# Altium footprint library Footprint_Vlad.PcbLib: 392 footprints (part 5 of 25)
Each footprint in its own frame and in the unit in brackets; x right, y up, seen from the top. Pads: shape width x height; smd on the part's side, far side on the other; paste and mask are expansions set on the pad; w line width, h text height; cw(c..) or ccw(c..) is an arc to the next point about the centre after c.
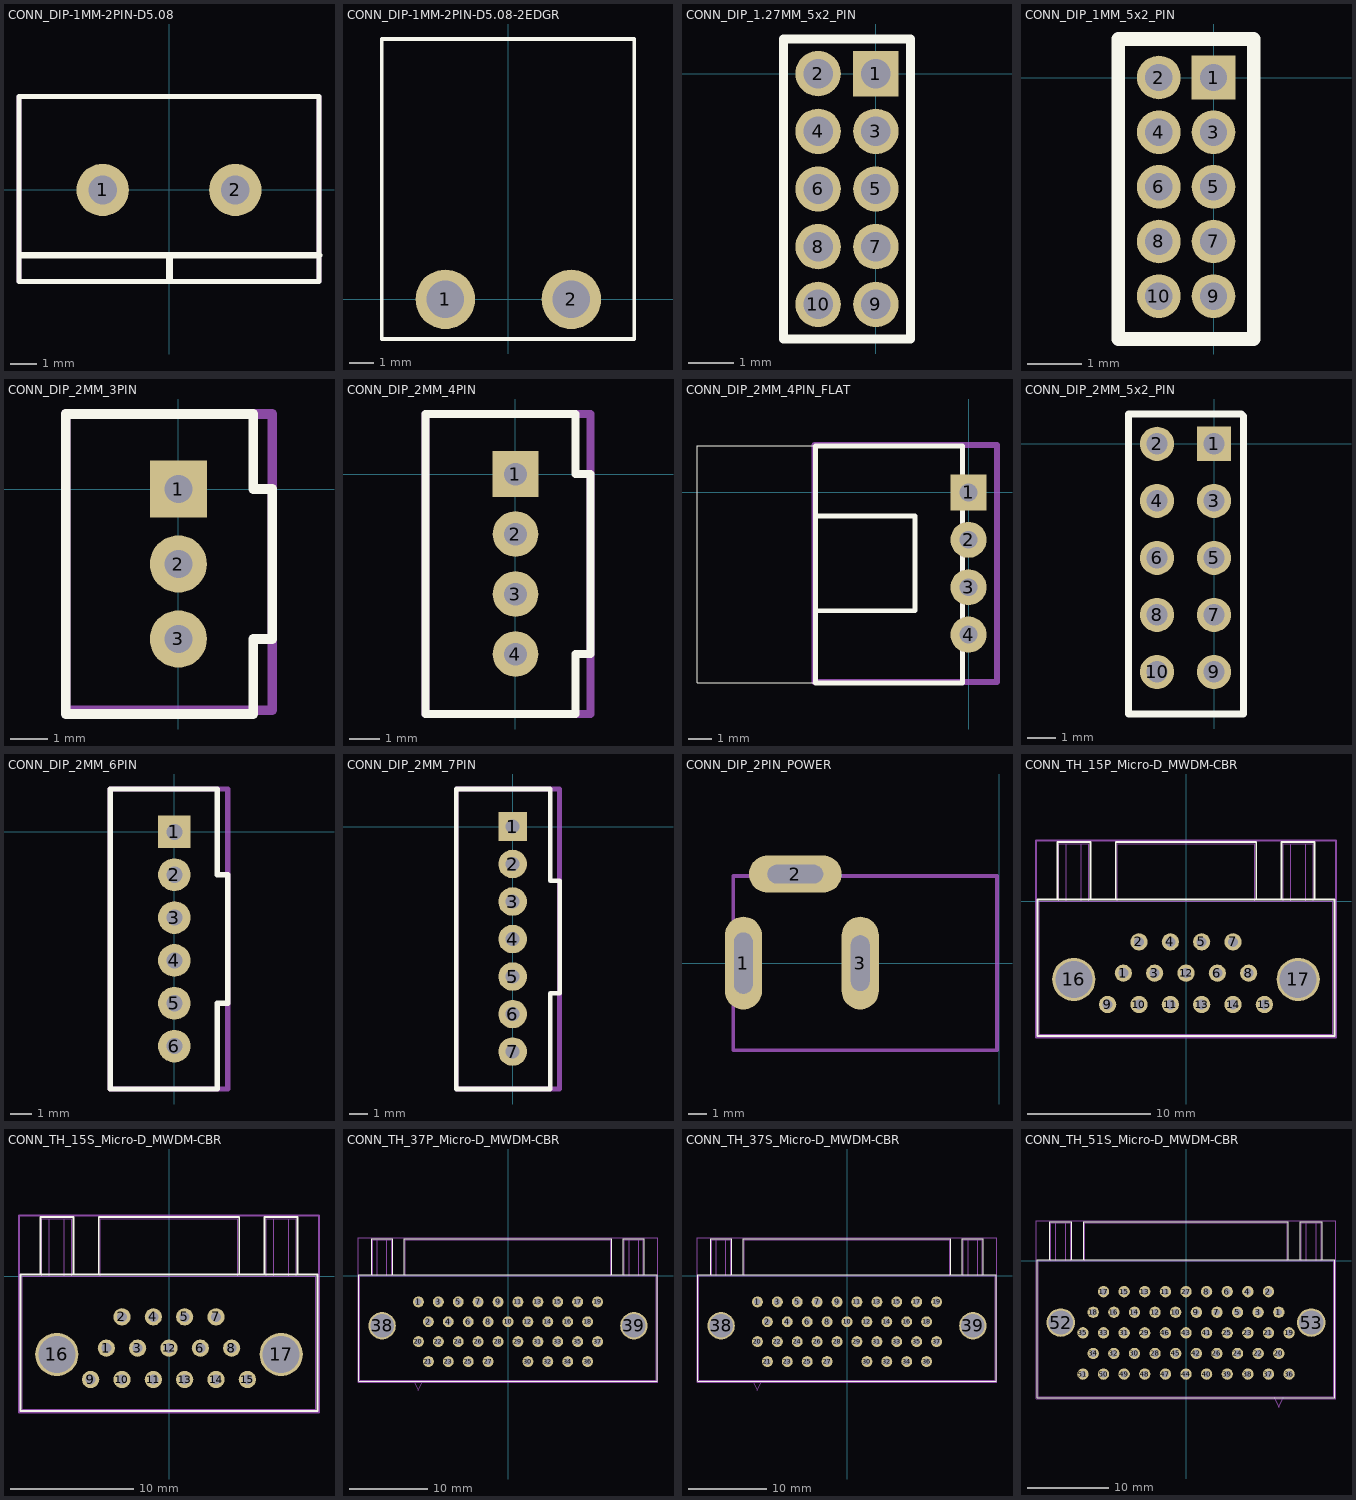
[diagram p4: the footprints below, top view; thin cyan lines are the x and y axes]

## CONN_DIP-1MM-2PIN-D5.08 [mm]
pads (2):
  round 2 hole 1.1: 1(-2.54,0) 2(2.54,0)
Top Overlay:
  lines w0.2: -5.74,-3.5 5.74,-3.5 5.74,3.575 -5.74,3.575 -5.74,-3.5
  lines w0.254: -5.7,-2.5 5.74,-2.5 ; 0.02,-3.4 0.02,-2.5
  text ".Designator" at -3.415,2.086 h1.52
Mechanical 15:
  lines w0.2: -5.74,-3.5 -5.74,3.575 5.74,3.575 5.74,-3.5 -5.74,-3.5
  text ".Designator" at -3.415,2.086 h1.52
3D body "38261.stp": height 15.1, standoff -3.4, extent -5.665,-4.8 5.065,4.7

## CONN_DIP-1MM-2PIN-D5.08-2EDGR [mm]
pads (2):
  round 2.4 hole 1.5: 1(-2.54,0) 2(2.54,0)
Top Overlay:
  lines w0.15: -5.1,-1.6 5.075,-1.6 5.075,10.5 -5.1,10.5 -5.1,-1.6
  text ".Designator" at -3.415,2.086 h1.52
Mechanical 15:
  text ".Designator" at -3.415,2.086 h1.52
3D body "User Library-2EDGR-5_08-02P.step": height 8.3, standoff -3.9, extent -5.09,-1.6 5.07,10.5

## CONN_DIP_1.27MM_5x2_PIN [mm]
pads (10):
  rect 1x1 hole 0.65: 1(0,0)
  round 1 hole 0.65: 2(-1.27,0) 3(0,-1.27) 4(-1.27,-1.27) 5(0,-2.54) 6(-1.27,-2.54) 7(0,-3.81) 8(-1.27,-3.81) 9(0,-5.08) 10(-1.27,-5.08)
Top Overlay:
  lines w0.2: -2.032,-5.842 -2.032,0.762 0.762,0.762 0.762,-5.842 -2.032,-5.842
Mechanical 15:
  text ".Designator" at -2.7,2.4 h1.52

## CONN_DIP_1MM_5x2_PIN [mm]
pads (10):
  rect 0.8x0.8 hole 0.5: 1(0,0)
  round 0.8 hole 0.5: 2(-1,0) 3(0,-1) 4(-1,-1) 5(0,-2) 6(-1,-2) 7(0,-3) 8(-1,-3) 9(0,-4) 10(-1,-4)
Top Overlay:
  lines w0.254: -1.744,-4.784 0.737,-4.784 0.737,0.705 -1.744,0.705 -1.744,-4.784
Mechanical 15:
  text ".Designator" at -2.7,2.4 h1.52

## CONN_DIP_2MM_3PIN [mil]
pads (3):
  rect 60x60 hole 29.53: 1(0,0)
  round 60 hole 29.53: 2(0,-78.74) 3(0,-157.48)
Top Overlay:
  lines w10: -118.11,-236.22 78.74,-236.22 78.74,-157.48 98.43,-157.48 98.43,0 78.74,0 78.74,78.74 -118.11,78.74 -118.11,-236.22
Mechanical 15:
  circle w10: c0,0 r11.81
  lines w10: -118.11,-232.28 98.43,-232.28 98.43,78.74 -118.11,78.74 -118.11,-232.28
  text ".Designator" at -118.11,94.49 h60

## CONN_DIP_2MM_4PIN [mil]
pads (4):
  rect 60x60 hole 29.53: 1(0,0)
  round 60 hole 29.53: 2(0,-78.74) 3(0,-157.48) 4(0,-236.22)
Top Overlay:
  lines w10: -118.11,-314.96 78.74,-314.96 78.74,-236.22 98.43,-236.22 98.43,0 78.74,0 78.74,78.74 -118.11,78.74 -118.11,-314.96
Mechanical 15:
  circle w10: c0,0 r8.8
  lines w10: -118.11,-314.96 -118.11,78.74 98.43,78.74 98.43,-314.96 -118.11,-314.96
  text ".Designator" at -98.43,98.43 h60

## CONN_DIP_2MM_4PIN_FLAT [mil]
pads (4):
  rect 60x60 hole 29.53: 1(0,0)
  round 60 hole 29.53: 2(0,-78.74) 3(0,-157.48) 4(0,-236.22)
Top Overlay:
  lines w1.97: -254.33,-316.54 -451.18,-316.54 -451.18,77.17 -254.33,77.17
  lines w7.87: -254.33,-196.46 -88.98,-196.46 -88.98,-38.98 -254.33,-38.98 ; -254.33,-316.54 -254.33,77.17 -10.24,77.17 -10.24,-316.54 -254.33,-316.54
Mechanical 15:
  circle w10: c0,0 r14.2
  lines w10: -255.91,-314.96 -255.91,78.74 47.24,78.74 47.24,-314.96 -255.91,-314.96
  text ".Designator" at -244.09,98.43 h60

## CONN_DIP_2MM_5x2_PIN [mm]
pads (10):
  rect 1.2x1.2 hole 0.75: 1(0,0)
  round 1.2 hole 0.75: 2(-2,0) 3(0,-2) 4(-2,-2) 5(0,-4) 6(-2,-4) 7(0,-6) 8(-2,-6) 9(0,-8) 10(-2,-8)
Top Overlay:
  lines w0.254: -3,-9.475 1.034,-9.475 1.034,-8 1.034,0.969 0.957,1.046 -3,1.046 -3,-9.475
Mechanical 15:
  text ".Designator" at -2.7,2.4 h1.52

## CONN_DIP_2MM_6PIN [mil]
pads (6):
  rect 60x60 hole 29.53: 1(0,0)
  round 60 hole 29.53: 2(0,-78.74) 3(0,-157.48) 4(0,-236.22) 5(0,-314.96) 6(0,-393.7)
Top Overlay:
  lines w10: -118.11,-472.44 78.74,-472.44 78.74,-314.96 98.43,-314.96 98.43,-78.74 78.74,-78.74 78.74,78.74 -118.11,78.74 -118.11,-472.44
Mechanical 15:
  circle w10: c0,0 r20.07
  lines w10: -118.11,-472.44 -118.11,78.74 98.43,78.74 98.43,-472.44 -118.11,-472.44
  text ".Designator" at -106.3,94.49 h60

## CONN_DIP_2MM_7PIN [mil]
pads (7):
  rect 60x60 hole 29.53: 1(0,0)
  round 60 hole 29.53: 2(0,-78.74) 3(0,-157.48) 4(0,-236.22) 5(0,-314.96) 6(0,-393.7) 7(0,-472.44)
Top Overlay:
  lines w10: 78.74,-350.22 78.74,-551 -118.11,-551 -118.11,78.74 78.74,78.74 78.74,-114 ; 79,-350.22 98.69,-350.22 98.69,-114 79,-114
Mechanical 15:
  circle w10: c0,0 r20.07
  lines w10: -118.11,-551 98.43,-551 98.43,78.74 -118.11,78.74 -118.11,-551
  text ".Designator" at -106.3,94.49 h60

## CONN_DIP_2PIN_POWER [mm]
pads (3):
  oval 2x5 hole 1 slot 3.3 at 90 deg: 1(-13.8,0)
  oval 5x2 hole 1 slot 3 at 0 deg: 2(-11,4.8)
  oval 2x5 hole 1 slot 3 at 90 deg: 3(-7.5,0)
Mechanical 13:
  lines w0.2: -14.351,-4.699 -0.127,-4.699 -0.127,4.699 -14.351,4.699 -14.351,-4.699
  text ".Designator" at -11.811,-4.064 h1.5
3D body "DJK-02A.step": height 11, standoff -3.78, extent -14.254,-4.65 -0.254,4.65

## CONN_TH_15P_Micro-D_MWDM-CBR [mil] "15 pin Glenair Micro-D MWDM-CBR Right Angle Thru-Hole"
height 309.84
pads (17):
  round 55 hole 32 mask+0: 1(-200,-230) 2(-150,-130) 3(-100,-230) 4(-50,-130) 5(50,-130) 6(100,-230) 7(150,-130) 8(200,-230) 9(-250,-330) 10(-150,-330) 11(-50,-330) 12(0,-230) 13(50,-330) 14(150,-330) 15(250,-330)
  round 137.8 hole 118.11 unplated: 16(-357.87,-250.08) 17(357.87,-250.08)
Top Overlay:
  lines w6: -473.5,-430 -473.5,5 473.5,5 473.5,-430 -472.44,-430 ; -410.5,7.87 -410.5,188 -304.5,188 -304.5,5 ; -224,7.87 -224,188 224,188 224,7.87 ; 304.5,5 304.5,188 410.5,188 410.5,5
Mechanical 13:
  lines w1: -405.5,0 -405.5,183 -309.5,183 -309.5,0 ; -381.5,0 -381.5,183 ; -333.5,0 -333.5,183 ; 309.5,0 309.5,183 405.5,183 405.5,0 ; 333.5,0 333.5,183 ; 381.5,0 381.5,183 ; -468.5,-425 468.5,-425 468.5,0 -468.5,0 -468.5,-425 ; -219,0 219,0 219,183 -219,183 -219,0
Mechanical 15:
  lines w6: -478.5,-435 -478.5,193 478.5,193 478.5,-435 -478.5,-435
3D body "mwdmxl-15pcbr.stp": height 312.4, standoff -106.5, extent -467.52,-420.08 467.52,186.22

## CONN_TH_15S_Micro-D_MWDM-CBR [mil] "15 pin Glenair Micro-D MWDM-CBR Right Angle Thru-Hole"
height 309.84
pads (17):
  round 55 hole 32 mask+0: 1(-200,-230) 2(-150,-130) 3(-100,-230) 4(-50,-130) 5(50,-130) 6(100,-230) 7(150,-130) 8(200,-230) 9(-250,-330) 10(-150,-330) 11(-50,-330) 12(0,-230) 13(50,-330) 14(150,-330) 15(250,-330)
  round 137.8 hole 118.11 unplated: 16(-357.87,-250.08) 17(357.87,-250.08)
Top Overlay:
  lines w6: -473.5,-430 -473.5,5 473.5,5 473.5,-430 -472.44,-430 ; -410.5,7.87 -410.5,188 -304.5,188 -304.5,5 ; -224,7.87 -224,188 224,188 224,7.87 ; 304.5,5 304.5,188 410.5,188 410.5,5
Mechanical 13:
  lines w1: -405.5,0 -405.5,183 -309.5,183 -309.5,0 ; -381.5,0 -381.5,183 ; -333.5,0 -333.5,183 ; 309.5,0 309.5,183 405.5,183 405.5,0 ; 333.5,0 333.5,183 ; 381.5,0 381.5,183 ; -468.5,-425 468.5,-425 468.5,0 -468.5,0 -468.5,-425 ; -219,0 219,0 219,183 -219,183 -219,0
Mechanical 15:
  lines w6: -478.5,-435 -478.5,193 478.5,193 478.5,-435 -478.5,-435
3D body "mwdmxl-15scbr.stp": height 312.4, standoff -101.77, extent -467.52,-420.08 467.52,198.04

## CONN_TH_37P_Micro-D_MWDM-CBR [mil] "37 pin Glenair Micro-D MWDM-CBR Right Angle Thru-Hole"
height 309.84
pads (39):
  round 55 hole 32 mask+0: 1(-450,-130) 2(-400,-230) 3(-350,-130) 4(-300,-230) 5(-250,-130) 6(-200,-230) 7(-150,-130) 8(-100,-230) 9(-50,-130) 10(0,-230) 11(50,-130) 12(100,-230) 13(150,-130) 14(200,-230) 15(250,-130) 16(300,-230) 17(350,-130) 18(400,-230) 19(450,-130) 20(-450,-330) 21(-400,-430) 22(-350,-330) 23(-300,-430) 24(-250,-330) 25(-200,-430) 26(-150,-330) 27(-100,-430) 28(-50,-330) 29(50,-330) 30(100,-430) 31(150,-330) 32(200,-430) 33(250,-330) 34(300,-430) 35(350,-330) 36(400,-430) 37(450,-330)
  round 137.8 hole 118.11 unplated: 38(-632.5,-250) 39(632.5,-250)
Top Overlay:
  lines w6: -685.5,7.87 -685.5,188 -579.5,188 -579.5,5 ; -521.5,7.87 -521.5,188 521.5,188 521.5,7.87 ; 579.5,5 579.5,188 685.5,188 685.5,5 ; -748.5,-530 -748.5,5 748.5,5 748.5,-530 -748.5,-530
Mechanical 13:
  lines w1: -680.5,0 -680.5,183 -584.5,183 -584.5,0 ; -656.5,0 -656.5,183 ; -608.5,0 -608.5,183 ; -475,-525 -450,-575 -425,-525 ; 584.5,0 584.5,183 680.5,183 680.5,0 ; 608.5,0 608.5,183 ; 656.5,0 656.5,183 ; -743.5,-525 -743.5,0 743.5,0 743.5,-525 -743.5,-525 ; -516.5,0 -516.5,183 516.5,183 516.5,0 -516.5,0
Mechanical 15:
  lines w6: -753.5,-535 753.5,-535 753.5,193 -753.5,193 -753.5,-535
3D body "mwdmxl-37pcbr.stp": height 312.4, standoff -106.5, extent -742.52,-520 742.52,186.22

## CONN_TH_37S_Micro-D_MWDM-CBR [mil] "37 pin Glenair Micro-D MWDM-CBR Right Angle Thru-Hole"
height 309.84
pads (39):
  round 55 hole 32 mask+0: 1(-450,-130) 2(-400,-230) 3(-350,-130) 4(-300,-230) 5(-250,-130) 6(-200,-230) 7(-150,-130) 8(-100,-230) 9(-50,-130) 10(0,-230) 11(50,-130) 12(100,-230) 13(150,-130) 14(200,-230) 15(250,-130) 16(300,-230) 17(350,-130) 18(400,-230) 19(450,-130) 20(-450,-330) 21(-400,-430) 22(-350,-330) 23(-300,-430) 24(-250,-330) 25(-200,-430) 26(-150,-330) 27(-100,-430) 28(-50,-330) 29(50,-330) 30(100,-430) 31(150,-330) 32(200,-430) 33(250,-330) 34(300,-430) 35(350,-330) 36(400,-430) 37(450,-330)
  round 137.8 hole 118.11 unplated: 38(-632.5,-250) 39(632.5,-250)
Top Overlay:
  lines w6: -685.5,7.87 -685.5,188 -579.5,188 -579.5,5 ; -521.5,7.87 -521.5,188 521.5,188 521.5,7.87 ; 579.5,5 579.5,188 685.5,188 685.5,5 ; -748.5,-530 748.5,-530 748.5,5 -748.5,5 -748.5,-530
Mechanical 13:
  lines w1: -680.5,0 -680.5,183 -584.5,183 -584.5,0 ; -656.5,0 -656.5,183 ; -608.5,0 -608.5,183 ; -475,-525 -450,-575 -425,-525 ; 584.5,0 584.5,183 680.5,183 680.5,0 ; 608.5,0 608.5,183 ; 656.5,0 656.5,183 ; -743.5,-525 743.5,-525 743.5,0 -743.5,0 -743.5,-525 ; -516.5,0 516.5,0 516.5,183 -516.5,183 -516.5,0
Mechanical 15:
  lines w6: -753.5,-535 -753.5,193 753.5,193 753.5,-535 -753.5,-535
3D body "mwdmxl-37scbr.stp": height 310.43, standoff -103.57, extent -742.52,-520 742.52,198.04

## CONN_TH_51S_Micro-D_MWDM-CBR [mil] "51 pin Glenair Micro-D MWDM-CBR Right Angle Thru-Hole"
height 351.18
pads (53):
  round 55 hole 32 mask+0: 1(450,-250) 2(400,-150) 3(350,-250) 4(300,-150) 5(250,-250) 6(200,-150) 7(150,-250) 8(100,-150) 9(50,-250) 10(-50,-250) 11(-100,-150) 12(-150,-250) 13(-200,-150) 14(-250,-250) 15(-300,-150) 16(-350,-250) 17(-400,-150) 18(-450,-250) 19(500,-350) 20(450,-450) 21(400,-350) 22(350,-450) 23(300,-350) 24(250,-450) 25(200,-350) 26(150,-450) 27(0,-150) 28(-150,-450) 29(-200,-350) 30(-250,-450) 31(-300,-350) 32(-350,-450) 33(-400,-350) 34(-450,-450) 35(-500,-350) 36(500,-550) 37(400,-550) 38(300,-550) 39(200,-550) 40(100,-550) 41(100,-350) 42(50,-450) 43(0,-350) 44(0,-550) 45(-50,-450) 46(-100,-350) 47(-100,-550) 48(-200,-550) 49(-300,-550) 50(-400,-550) 51(-500,-550)
  round 137.8 hole 118.11 unplated: 52(-607.5,-300) 53(607.5,-300)
Top Overlay:
  lines w6: -660.5,7.87 -660.5,188 -554.5,188 -554.5,5 ; -496.5,7.87 -496.5,188 496.5,188 496.5,7.87 ; 554.5,5 554.5,188 660.5,188 660.5,5 ; -722.5,-665 722.5,-665 722.5,5 -722.5,5 -722.5,-665
Mechanical 13:
  lines w1: -655.5,0 -655.5,183 -559.5,183 -559.5,0 ; -631.5,0 -631.5,183 ; -583.5,0 -583.5,183 ; 425,-660 450,-710 475,-660 ; 559.5,0 559.5,183 655.5,183 655.5,0 ; 583.5,0 583.5,183 ; 631.5,0 631.5,183 ; -717.5,-660 717.5,-660 717.5,0 -717.5,0 -717.5,-660 ; -491.5,0 491.5,0 491.5,183 -491.5,183 -491.5,0
Mechanical 15:
  lines w6: -727.5,-670 -727.5,193 727.5,193 727.5,-670 -727.5,-670
3D body "mwdmxl-51scbr.stp": height 352.76, standoff -114.24, extent -717.52,-650 717.52,198.04